# Altium schematic symbol library ADE-5+.SchLib: 1 symbol
Pins are listed as number, name and electrical type; pins without a type are passive.

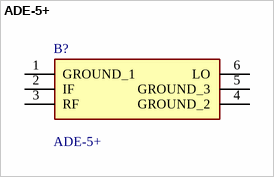
[diagram p0: symbol ADE-5+]

## ADE-5+
designator B?
RF Mixer DBL BAL MIX / SURF MT /   RoHS; Manufacturer_Name: Mini-Circuits; Geometry.Height: 2.84mm; Mouser Part Number: 139-ADE-5; Mouser Price/Stock: https://www.mouser.co.uk/ProductDetail/Mini-Circuits/ADE-5%2b?qs=xZ%2FP%252Ba9zWqYmwk%2F%2Fds48gw%3D%3D; Manufacturer_Part_Number: ADE-5+; Datasheet Link: https://www.minicircuits.com/pdfs/ADE-5+.pdf
footprint ADE5
pins: 1 GROUND_1, 2 IF, 3 RF, 4 GROUND_2, 5 GROUND_3, 6 LO